# EAGLE library part FM25V10-G (library FM25V10-G)
F-RAM,128KB,SPI,40MHz,3V,SOIC8 FM25V10-G Serial-SPI FRAM Memory, 1Mbit, 2 3.6 V 8-Pin SOIC Source: Datasheet <http://www.cypress.com/file/41691/download>
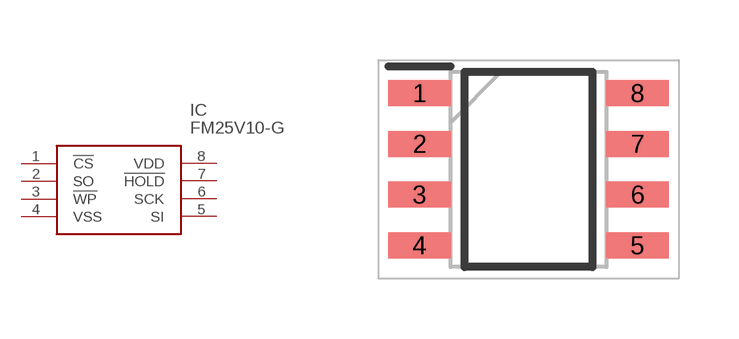
[diagram p0: symbol with the pads of SOIC127P602X173-8N; footprint SOIC127P602X173-8N]

Designator prefix IC

## FM25V10-G (Description: F-RAM,128KB,SPI,40MHz,3V,SOIC8 FM25V10-G Serial-SPI FRAM Memory, 1Mbit, 2 3.6 V 8-Pin SOIC; Height: 1.727mm; Manufacturer_Name: Infineon; Manufacturer_Part_Number: FM25V10-G; Mouser_Part_Number: 877-FM25V10-G; Mouser_Price-Stock: https://www.mouser.co.uk/ProductDetail/Infineon-Technologies/FM25V10-G?qs=pA5MXup5wxFqKGjf8NeQmw%3D%3D)  [SOIC127P602X173-8N]
1  !CS
2  SO
3  !WP
4  VSS
5  SI
6  SCK
7  !HOLD
8  VDD

## Footprint SOIC127P602X173-8N (pad centres in mm)
8-pin SOIC
smd 1.551 x 0.65: 1 -2.725,1.905; 2 -2.725,0.635; 3 -2.725,-0.635; 4 -2.725,-1.905; 5 2.725,-1.905; 6 2.725,-0.635; 7 2.725,0.635; 8 2.725,1.905